# Altium schematic symbol library Schlib1.SchLib: 30 symbols
Pins are listed as number, name and electrical type; pins without a type are passive.

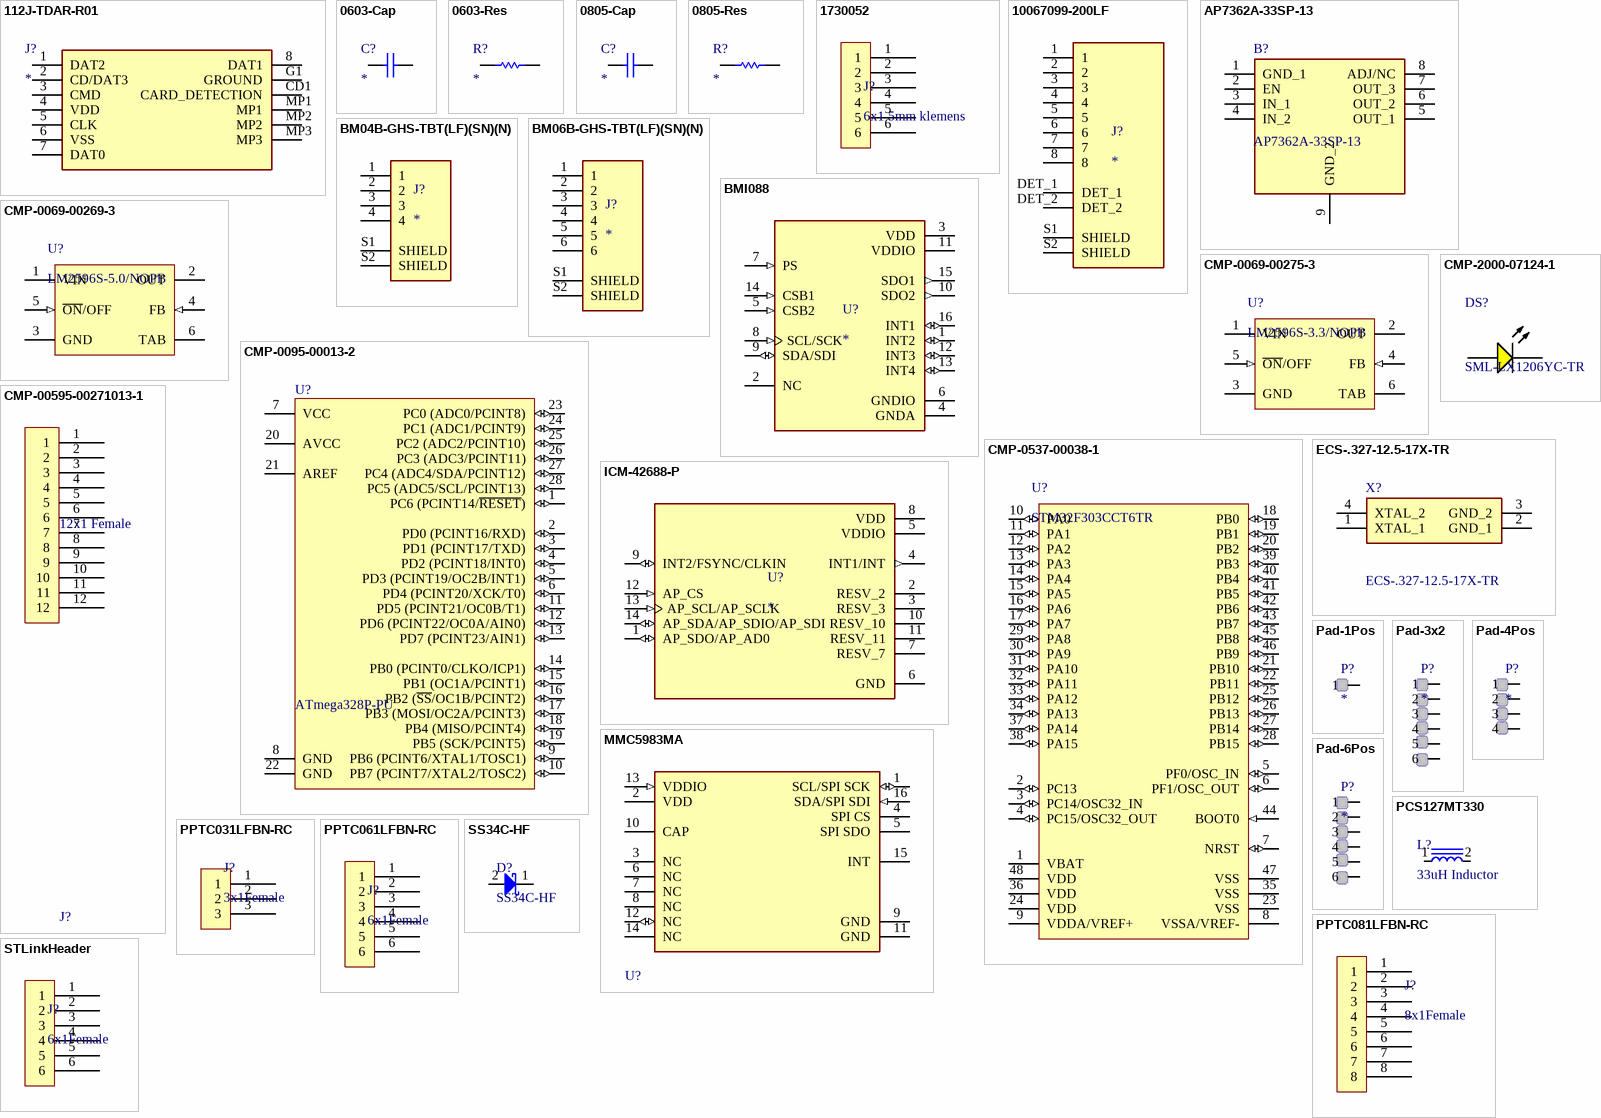
[diagram p0: symbols 112J-TDAR-R01 to STLinkHeader]

## 112J-TDAR-R01
designator J?
Connector; Manufacturer_Name: ATTEND; Manufacturer_Part_Number: 112J-TDAR-R01; Datasheet Link: https://cdn.sos.sk/productdata/2c/8b/de324bd3/112j-tdar-r01.pdf; Height: 2mm
footprint 112JTDARR01
pins: 1 DAT2, 2 CD/DAT3, 3 CMD, 4 VDD, 5 CLK, 6 VSS, 7 DAT0, 8 DAT1, CD1 CARD_DETECTION, G1 GROUND, MP1, MP2, MP3

## 0603-Cap
designator C?
footprint Capacitor-0603
pins: 1, 2

## 0603-Res
designator R?
footprint Resistor-0603
pins: 1, 2

## 0805-Cap
designator C?
footprint Capacitor-0805
pins: 1, 2

## 0805-Res
designator R?
footprint Resistor-0805
pins: 1, 2

## 1730052
designator J?, comment 6x1 5mm klemens
Phoenix Contact 1730052, MKDSP 1, 5/ 6, PCB terminal block; Supplier: Mouser; Supplier Part Number: 651-1730052; Manufacturer: Phoenix Contact; Manufacturer Part Number: 1730052; RoHS: Yes; Category: Terminal Blocks; Stock: 50; Pricing: 1=4,93, 10=4,84, 50=4,52, 100=4,16, 1000=3,98, 10000=3,98 (USD); ComponentLink1URL: http://components.arrow.com/part/dataview/51058200S75511N1555?src-supplier=Arrow+Electronics; ComponentLink1Description: http://components.arrow.com/part/dataview/51058200S75511N1555?src-supplier=Arrow+Electronics; ComponentLink2URL: http://www.phoenixcontact.com/us/products/1730052/pdf?src-supplier=Mouser; ComponentLink2Description: http://www.phoenixcontact.com/us/products/1730052/pdf?src-supplier=Mouser
footprint 6x1 5mm klemens
pins: 1, 2, 3, 4, 5, 6

## 10067099-200LF
designator J?
MF: {'manufacturer': u'Amphenol ICC (FCI)'}; MP: 10067099-200LF; Package: None; Price: None; Value: *; Availability: Unavailable
footprint AMPHENOL_10067099-200LF
pins: 1, 2, 3, 4, 5, 6, 7, 8, DET_1, DET_2, S1 SHIELD, S2 SHIELD

## AP7362A-33SP-13
designator B?
LDO Voltage Regulators LDO CMOS HiCurr SO-8 1.5A LowQ Adj 190mV; Manufacturer_Name: Diodes Incorporated; Geometry.Height: 1.5mm; Manufacturer_Part_Number: AP7362A-33SP-13; Mouser Part Number: 621-AP7362A-33SP-13; Mouser Price/Stock: https://www.mouser.co.uk/ProductDetail/Diodes-Incorporated/AP7362A-33SP-13?qs=M%2FOdCRO8QQ3CiX1oDLy5Bg%3D%3D; Arrow Part Number: AP7362A-33SP-13; Arrow Price/Stock: https://www.arrow.com/en/products/ap7362a-33sp-13/diodes-incorporated?utm_currency=USD&region=nac; Datasheet Link: https://www.diodes.com/assets/Datasheets/AP7362.pdf
footprint SOIC127P600X150-9N
pins: 1 GND_1, 2 EN, 3 IN_1, 4 IN_2, 5 OUT_1, 6 OUT_2, 7 OUT_3, 8 ADJ/NC, 9 GND_2

## BM04B-GHS-TBT(LF)(SN)(N)
designator J?
Conn Shrouded Header HDR 4 POS 1.25mm Solder ST Top Entry SMD T/R; MF: JST; MP: BM04B-GHS-TBT (LF)(SN)(N); SnapEDA_Link: https://www.snapeda.com/parts/BM04B-GHS-TBT%20(LF)(SN)(N)/JST/view-part/?ref=snap; Package: None; Value: *; Check_prices: https://www.snapeda.com/parts/BM04B-GHS-TBT%20(LF)(SN)(N)/JST/view-part/?ref=eda
footprint JST_BM04B-GHS-TBT(LF)(SN)(N)
pins: 1, 2, 3, 4, S1 SHIELD, S2 SHIELD

## BM06B-GHS-TBT(LF)(SN)(N)
designator J?
Connector Header Surface Mount 6 position 0.049 (1.25mm); MF: JST Sales; MP: BM06B-GHS-TBT(LF)(SN)(N); SnapEDA_Link: https://www.snapeda.com/parts/BM06B-GHS-TBT(LF)(SN)(N)/JST/view-part/?ref=snap; Package: None; Value: *; Check_prices: https://www.snapeda.com/parts/BM06B-GHS-TBT(LF)(SN)(N)/JST/view-part/?ref=eda
footprint JST_BM06B-GHS-TBT(LF)(SN)(N)
pins: 1, 2, 3, 4, 5, 6, S1 SHIELD, S2 SHIELD

## BMI088
designator U?
High-performance 6-axis inertial sensor (accelerometer + gyroscope) <a href="https://pricing.snapeda.com/parts/BMI088/Bosch%20Sensortec/view-part?ref=eda">Check prices</a>; MP: BMI088; Package: None; Value: *; Availability: Unavailable; Price: None
footprint PQFN50P450X300X100-16N
pins: 1 INT2 (io), 2 NC, 3 VDD (power), 4 GNDA (power), 5 CSB2 (in), 6 GNDIO (power), 7 PS (in), 8 SCL/SCK (in), 9 SDA/SDI (io), 10 SDO2 (out), 11 VDDIO (power), 12 INT3 (io), 13 INT4 (io), 14 CSB1 (in), 15 SDO1 (out), 16 INT1 (io)

## CMP-0069-00269-3
designator U?, comment LM2596S-5.0/NOPB
SIMPLE SWITCHER® Power Converter 150 KHz 3A Step-Down Voltage Regulator, 5-pin TO-263, Pb-Free; Manufacturer: Texas Instruments; PowerWise: N; PackageTopMarking: NSUZXYTTE#*LM2596S*-5.0 P+; ComponentLink1URL: http://www.ti.com/general/docs/lit/getliterature.tsp?genericPartNumber=LM2596&fileType=pdf; PackageDescription: TO-263, Molded, .400 x .390 x .180in, 5 Lead, .067in Pitch, Surface Mount; RoHS: Y; PinCount: 5; Code_JEDEC: MO-169-AB; ComponentLink1Description: Datasheet URL; PackageReference: KTT0005B; CompType: Switcher
footprint KTT0005B_N (DPAK, 5-Leads, Body 10.65x9.65mm, Pitch 1.7mm, IPC Medium Density)
footprint KTT0005B_M (DPAK, 5-Leads, Body 10.65x9.65mm, Pitch 1.7mm, IPC Low Density)
footprint KTT0005B_L (DPAK, 5-Leads, Body 10.65x9.65mm, Pitch 1.7mm, IPC High Density)
pins: 1 VIN (power), 2 OUT (power), 3 GND (power), 4 FB (in), 5 ~{ON}/OFF (in), 6 TAB (power)

## CMP-0069-00275-3
designator U?, comment LM2596S-3.3/NOPB
SIMPLE SWITCHER® Power Converter 150 KHz 3A Step-Down Voltage Regulator, 5-pin TO-263, Pb-Free; Manufacturer: Texas Instruments; PackageTopMarking: NSUZXYTTE#*LM2596S*-3.3 P+; PowerWise: N; RoHS: Y; PackageReference: KTT0005B; PackageDescription: TO-263, Molded, .400 x .390 x .180in, 5 Lead, .067in Pitch, Surface Mount; PinCount: 5; ComponentLink1Description: Datasheet URL; Code_JEDEC: MO-169-AB; ComponentLink1URL: http://www.ti.com/general/docs/lit/getliterature.tsp?genericPartNumber=LM2596&fileType=pdf; CompType: Switcher
footprint KTT0005B_N (DPAK, 5-Leads, Body 10.65x9.65mm, Pitch 1.7mm, IPC Medium Density)
footprint KTT0005B_M (DPAK, 5-Leads, Body 10.65x9.65mm, Pitch 1.7mm, IPC Low Density)
footprint KTT0005B_L (DPAK, 5-Leads, Body 10.65x9.65mm, Pitch 1.7mm, IPC High Density)
pins: 1 VIN (power), 2 OUT (power), 3 GND (power), 4 FB (in), 5 ~{ON}/OFF (in), 6 TAB (power)

## CMP-0095-00013-2
designator U?, comment ATmega328P-PU
8-bit AVR Microcontroller, 32KB Flash, 1KB EEPROM, 2KB SRAM, 28-pin PDIP, Industrial Grade (-40°C to 85°C); RevisionNote: DatasheetVersion updated. URLs added.; PackageVersion: revB, Sep-2001; PackageDescription: 28-lead (0.300"/7.62mm Wide) Plastic Dual Inline Package (PDIP); DatasheetVersion: revD, May-2011; ComponentLink1Description: Manufacturer URL; ComponentLink1URL: http://www.atmel.com/; PackageReference: 28P3; ComponentLink2Description: ATmega48A/48PA/88A/88PA/168A/168PA/328/328P Datasheet; ComponentLink3URL: http://www.atmel.com/dyn/resources/prod_documents/8271S.pdf; ComponentLink2URL: http://www.atmel.com/dyn/resources/prod_documents/8271.pdf; ComponentLink3Description: ATmega48A/48PA/88A/88PA/168A/168PA/328/328P Summary
footprint 28P3 (28-Pin Plastic Dual In-Line Package (PDIP))
pins: 1 PC6 (PCINT14/~{RESET}) (io), 2 PD0 (PCINT16/RXD) (io), 3 PD1 (PCINT17/TXD) (io), 4 PD2 (PCINT18/INT0) (io), 5 PD3 (PCINT19/OC2B/INT1) (io), 6 PD4 (PCINT20/XCK/T0) (io), 7 VCC (power), 8 GND (power), 9 PB6 (PCINT6/XTAL1/TOSC1) (io), 10 PB7 (PCINT7/XTAL2/TOSC2) (io), 11 PD5 (PCINT21/OC0B/T1) (io), 12 PD6 (PCINT22/OC0A/AIN0) (io), 13 PD7 (PCINT23/AIN1) (io), 14 PB0 (PCINT0/CLKO/ICP1) (io), 15 PB1 (OC1A/PCINT1) (io), 16 PB2 (~{SS}/OC1B/PCINT2) (io), 17 PB3 (MOSI/OC2A/PCINT3) (io), 18 PB4 (MISO/PCINT4) (io), 19 PB5 (SCK/PCINT5) (io), 20 AVCC (power), 21 AREF (power), 22 GND (power), 23 PC0 (ADC0/PCINT8) (io), 24 PC1 (ADC1/PCINT9) (io), 25 PC2 (ADC2/PCINT10) (io), 26 PC3 (ADC3/PCINT11) (io), 27 PC4 (ADC4/SDA/PCINT12) (io), 28 PC5 (ADC5/SCL/PCINT13) (io)

## CMP-0537-00038-1
designator U?, comment STM32F303CCT6TR
ARM Cortex-M4 32-bit MCU, 256 KB Flash, 48 KB Internal RAM, 37 I/Os, 48-Pin LQFP, -40 to 85 degC, Tape and Reel; I/Os (High Current): 37; Operating Frequency(F) (Processor speed) (MHz): 72; FLASH Size (Prog) (kB): 256; Supply Voltage(Vcc) min (V): 2; Internal RAM Size (kB): 48; Package Description: 48-Pin Low Profile Quad Flat Package, Body 7 x 7 mm, Pitch 0.5 mm; ComponentLink1URL: http://www.st.com/; Package Reference: LQFP48; ComponentLink1Description: Manufacturer URL; Packing: Tape and Reel; Core: ARM Cortex-M4; ComponentLink2Description: Datasheet; DatasheetVersion: Rev. 11; ComponentLink2URL: http://www.st.com/st-web-ui/static/active/en/resource/technical/document/datasheet/DM00058181.pdf; D/A Converter: 2; Mounting Technology: Surface Mount
footprint STM-LQFP48_L (QFP, 48-Leads, Body 7x7mm, Pitch 0.5mm, IPC High Density)
footprint STM-LQFP48_M (QFP, 48-Leads, Body 7x7mm, Pitch 0.5mm, IPC Low Density)
footprint STM-LQFP48_N (QFP, 48-Leads, Body 7x7mm, Pitch 0.5mm, IPC Medium Density)
pins: 1 VBAT (power) "Backup power supply", 2 PC13 (io) "PC13/TIM1_CH1N/RTC_TAMP1/RTC_TS/RTC_OUT/WKUP2", 3 PC14/OSC32_IN (io), 4 PC15/OSC32_OUT (io), 5 PF0/OSC_IN (io) "PF0/TIM1_CH3N/OSC_IN", 6 PF1/OSC_OUT (io), 7 NRST (io) "Device reset input/internal reset output (active low)", 8 VSSA/VREF- (power) "Analog ground/Negative reference voltage", 9 VDDA/VREF+ (power) "Analog power supply/Positive reference voltage", 10 PA0 (io) "PA0/TIM2_CH1/TIM2_ETR,TSC_G1_IO1,USART2_CTS,EVENTOUT/ADC1_IN1,RTC_TAMP2/WKUP1", 11 PA1 (io) "PA1/TIM2_CH2,TSC_G1_IO2,USART2_RTS_DE,TIM15_CH1N,EVENTOUT/ADC1_IN2,RTC_REFIN", 12 PA2 (io) "PA2/TIM2_CH3,TSC_G1_IO3,USART2_TX,COMP2_OUT,TIM15_CH1,EVENTOUT/ADC1_IN3,COMP2_INM", 13 PA3 (io) "PA3/TIM2_CH4,TSC_G1_IO4,USART2_RX,TIM15_CH2,EVENTOUT/ADC1_IN4", 14 PA4 (io) "PA4/TIM3_CH2,TSC_G2_IO1,SPI1_NSS,USART2_CK,EVENTOUT/ADC2_IN1,DAC1_OUT1,COMP2_INM4,COMP4_INM4,COMP6_INM4", 15 PA5 (io) "PA5/TIM2_CH1/TIM2_ETR,TSC_G2_IO2,SPI1_SCK,EVENTOUT/ADC2_IN2,DAC1_OUT2,OPAMP2_VINM", 16 PA6 (io) "PA6/TIM16_CH1,TIM3_CH1,TSC_G2_IO3,SPI1_MISO,TIM1_BKIN,EVENTOUT/ADC2_IN3,DAC2_OUT1,OPAMP2_VOUT", 17 PA7 (io) "PA7/TIM17_CH1,TIM3_CH2,TSC_G2_IO4,SPI1_MOSI,TIM1_CH1N,EVENTOUT/ADC2_IN4,COMP2_INP,OPAMP2_VINP", 18 PB0 (io) "PB0/TIM3_CH3,TSC_G3_IO2,TIM1_CH2N,EVENTOUT/ADC1_IN11,COMP4_INP,OPAMP2_VINP", 19 PB1 (io) "PB1/TIM3_CH4,TSC_G3_IO3,TIM1_CH3N,COMP4_OUT,EVENTOUT/ADC1_IN12", 20 PB2 (io) "PB2/TSC_G3_IO4,EVENTOUT/ADC2_IN12,COMP4_INM", 21 PB10 (io) "PB10/TIM2_CH3,TSC_SYNC,USART3_TX,EVENTOUT", 22 PB11 (io) "PB11/TIM2_CH4,TSC_G6_IO1,USART3_RX,EVENTOUT/COMP6_INP", 23 VSS (power) "Digital ground", 24 VDD (power) "Digital power supply", 25 PB12 (io) "PB12/TSC_G6_IO2,TIM1_BKIN,USART3_CK,EVENTOUT/ADC2_IN13", 26 PB13 (io) "PB13/TSC_G6_IO3,TIM1_CH1N,USART3_CTS,EVENTOUT/ADC1_IN13", 27 PB14 (io) "PB14/TIM15_CH1,TSC_G6_IO4,TIM1_CH2N,USART3_RTS_DE,EVENTOUT/ADC2_IN14,OPAMP2_VINP", 28 PB15 (io) "PB15/TIM15_CH2,TIM15_CH1N,TIM1_CH3N,EVENTOUT/ADC2_IN15,COMP6_INM,RTC_REFIN", 29 PA8 (io) "PA8/MCO,TIM1_CH1,USART1_CK,EVENTOUT", 30 PA9 (io) "PA9/TSC_G4_IO1,TIM1_CH2,USART1_TX,TIM15_BKIN,TIM2_CH3,EVENTOUT", 31 PA10 (io) "PA10/TIM17_BKIN,TSC_G4_IO2,TIM1_CH3,USART1_RX,COMP6_OUT,TIM2_CH4,EVENTOUT", 32 PA11 (io) "PA11/TIM1_CH1N,USART1_CTS,CAN_RX,TIM1_CH4,TIM1_BKIN2,EVENTOUT", 33 PA12 (io) "PA12/TIM16_CH1,TIM1_CH2N,USART1_RTS_DE,COMP2_OUT,CAN_TX,TIM1_ETR,EVENTOUT", 34 PA13 (io) "PA13/JTMS/SWDAT,TIM16_CH1N,TSC_G4_IO3,IR_OUT,USART3_CTS,EVENTOUT", 35 VSS (power), 36 VDD (power), 37 PA14 (io) "PA14/JTCK/SWCLK,TSC_G4_IO4,I2C1_SDA,TIM1_BKIN,USART2_TX,EVENTOUT", 38 PA15 (io) "PA15/JTDI,TIM2_CH1/TIM2_ETR,TSC_SYNC,I2C1_SCL,SPI1_NSS,USART2_RX,TIM1_BKIN,EVENTOUT", 39 PB3 (io) "PB3/JTDO/TRACESWO,TIM2_CH2,TSC_G5_IO1,SPI1_SCK,USART2_TX,TIM3_ETR,EVENTOUT", 40 PB4 (io) "PB4/NJTRST,TIM16_CH1,TIM3_CH1,TSC_G5_IO2,SPI1_MISO,USART2_RX,TIM17_BKIN,EVENTOUT", 41 PB5 (io) "PB5/TIM16_BKIN,TIM3_CH2,I2C1_SMBA,SPI1_MOSI,USART2_CK,TIM17_CH1,EVENTOUT", 42 PB6 (io) "PB6/TIM16_CH1N,TSC_G5_IO3,I2C1_SCL,USART1_TX,EVENTOUT", 43 PB7 (io) "PB7/TIM17_CH1N,TSC_G5_IO4,I2C1_SDA,USART1_RX,TIM3_CH4,EVENTOUT", 44 BOOT0 (in), 45 PB8 (io) "PB8/TIM16_CH1,TSC_SYNC,I2C1_SCL,USART3_RX,CAN_RX,TIM1_BKIN,EVENTOUT", 46 PB9 (io) "PB9/TIM17_CH1,I2C1_SDA,IR_OUT,USART3_TX,COMP2_OUT,CAN_TX,EVENTOUT", 47 VSS (power), 48 VDD (power)

## CMP-00595-00271013-1
designator J?, comment 12x1 Female
Conn Socket Strip F 12 POS 2.54mm Solder ST Thru-Hole; Part Number: PPTC121LFBN-RC; Manufacturer: Sullins; Is Female: yes; Symbol Hash: ea067654d0183d61e035900691e2d6794c626c0b8445c548c6502567bdefb3d8; Current Rating: 3A; Verification Version: 0.0.0.3; Voltage Rating: 250V; Number Of Contacts: 12; Conn Orientation: Straight; Connector Type: Header, Socket; Datasheet Version: L; Conn Gender: Female; Temperature Range High: +105°C; Digikey Description: CONN HDR 12POS 0.1 TIN PCB; Datasheet Date: 2019-08-20; Digikey Part Number: S6100-ND; ComponentLink2URL: https://drawings-pdf.s3.amazonaws.com/10492.pdf; ComponentLink2Description: Datasheet; Lead Free: Yes; Height: 8.7mm; Automotive: No; Temperature Range Low: -40°C; RoHS: TRUE; Pitch: 2.54mm; Number Of Rows: 1; Contact Material: Tin,Nickel; Package: 0; ComponentLink1Description: Upverter; Supplier 2: Mouser; Supplier 1: Digi-Key; ComponentLink1URL: https://upverter.com/part/id/4e787b82c790916c/; Supplier Part Number 1: S6100-ND; helpURL: https://upverter.com/part/id/4e787b82c790916c/; Temperature: -40°C to +105°C; ComponentLink2Description: Datasheet URL; Number of Positions: 12; Contact Material: Nickel, Tin; HelpURL: https://drawings-pdf.s3.amazonaws.com/10492.pdf; Lead Free: Lead Free; Min Operating Temperature: -40°C; Number of Rows: 1; Number of Contacts: 12; Mount: Through Hole; Width: 2.5mm; Length: 31mm; Packaging: Bulk; Housing Material: Plastic; Termination: Solder; Contact Plating: Tin; Max Operating Temperature: 105°C; RoHS: Compliant; Color: Black
footprint PPTC121LFBN-RC_MFG
pins: 1, 2, 3, 4, 5, 6, 7, 8, 9, 10, 11, 12

## CMP-2000-07124-1
designator DS?, comment SML-LX1206YC-TR
Yellow LED, Water Clear Len, 585 nm, 2.1 V, -40 to 85 degC, 2-Pin SMD, RoHS, Tape and Reel; Manufacturer: Lumex; Product Training Modules: LEDsBenefitsofCustomLEDandLCDTechnology; Millicandela Rating: 6mcd; Catalog Drawings: SML-LX1206SeriesTopSML-LX1206SeriesSideSML-LX1206SeriesBottomSML-LX1206SeriesFootprint; Wavelength - Peak: 585nm; Other Names: 67-1358-2LU60357TRSMLLX1206YCTR; Lens Style/Size: RectanglewithFlatTop; Current - Test: 20mA; Lens Color: Colorless; Viewing Angle: 160°; Voltage - Forward (Vf) (Typ): 2.1V; Online Catalog: SML-LX1206RectanglewithFlatTop1206PackageLEDs; Mounting Type: SurfaceMount; Package Description: 2-Pin Surface Mount Device, Body 3.2 x 1.5 mm; Datasheet Version: Rev. K, 08/2012; Features: -; Color: Yellow; RoHS Information: RoHSCertofCompliance; Package Reference: SML-LX1206YC-TR; Supplier Device Package: 1206; Standard Package: 3,000; Series: -; Wavelength - Dominant: -; Package / Case: 1206(3216Metric); Mounting Technology: SurfaceMount; Height (Max): 1.10mm; Lens Transparency: Clear; Datasheet URL: http://www.lumex.com/content/files/ProductAttachment/SML-LX1206YC-TR.pdf; Family: LEDIndication-Discrete; Manufacturer URL: http://www.lumexinstruments.com/; Packaging: Tape&Reel(TR); Category: Optoelectronics; Size / Dimension: 3.20mmLx1.60mmW
footprint LUMX-SML-LX1206YC-TR_V (SMD, 2-Leads, Body 3.2x1.5mm)
pins: 1 A, 2 K

## ECS-.327-12.5-17X-TR
designator X?
Crystals 32.768 KHz 12.5pF; Manufacturer_Name: ECS; Geometry.Height: 2.5mm; Mouser Part Number: 520-ECS327-12.5-17X; Mouser Price/Stock: https://www.mouser.co.uk/ProductDetail/ECS/ECS-.327-12.5-17X-TR?qs=CkbNAJEAr%2FTBahk9YtN2eg%3D%3D; Manufacturer_Part_Number: ECS-.327-12.5-17X-TR; Datasheet Link: https://www.ecsxtal.com/store/pdf/ecx-306x.pdf
footprint ECS32712517XTR
pins: 1 XTAL_1, 2 GND_1, 3 GND_2, 4 XTAL_2

## ICM-42688-P
designator U?
Accelerometer, Gyroscope, 6 Axis Sensor Output; MP: ICM-42688-P; Package: None; Value: *; Availability: Unavailable; Price: None
footprint PQFN50P300X250X97-14N
pins: 1 AP_SDO/AP_AD0 (io), 2 RESV_2, 3 RESV_3, 4 INT1/INT (out), 5 VDDIO (power), 6 GND (power), 7 RESV_7, 8 VDD (power), 9 INT2/FSYNC/CLKIN (io), 10 RESV_10, 11 RESV_11, 12 AP_CS (in), 13 AP_SCL/AP_SCLK (in), 14 AP_SDA/AP_SDIO/AP_SDI (io)

## MMC5983MA
designator U?  (value not drawn)
footprint Memsic_0_MFG
pins: 1 SCL/SPI SCK (io), 2 VDD, 3 NC, 4 SPI CS, 5 SPI SDO (power), 6 NC, 7 NC (power), 8 NC, 9 GND (power), 10 CAP, 11 GND, 12 NC (io), 13 VDDIO (in), 14 NC (power), 15 INT, 16 SDA/SPI SDI (in)

## Pad-1Pos
designator P?
footprint Pad-1Pos
pins: 1

## Pad-3x2
designator P?
footprint Pad-3x2
pins: 1, 2, 3, 4, 5, 6

## Pad-4Pos
designator P?
footprint Pad-4Pos
pins: 1, 2, 3, 4

## Pad-6Pos
designator P?
footprint Pad-6 Pos
pins: 1, 2, 3, 4, 5, 6

## PCS127MT330
designator L?, comment 33uH Inductor
Inductor Power Shielded Wirewound 33uH 20% 1KHz Ferrite 3A 65mOhm DCR T/R; Manufacturer: Stackpole Electronics; Manufacturer Part Number: PCS127MT330; Supplier: Avnet; Supplier Part Number: PCS127MT330; RoHS: Yes; Category: Inductors; Core Material: Ferrite; Packaging: Tape and Reel; Tolerance: 20%; Value: 33uH; Max DC Current: 3A; Height: 8mm; Depth: 12.3mm; Radiation Hardening: No; RoHS Compliant: Yes; ComponentLink1URL: https://www.seielect.com/catalog/SEI-pcs.pdf?src-supplier=Avnet; ComponentLink1Description: https://www.seielect.com/catalog/SEI-pcs.pdf?src-supplier=Avnet
footprint FP-DR127-MFG
pins: 1, 2

## PPTC031LFBN-RC
designator J?, comment 3x1Female
Female, 3C, Straight, .100"CC; 3.20mm Tail, No Mt. 100u" Tin; PBT, Phos Bronze, 105 C; Manufacturer: Sullins; Manufacturer Part Number: PPTC031LFBN-RC; Supplier: Future Electronics; Supplier Part Number: 2482834; RoHS: Yes; Category: Connectors; Pricing: 1000=0,179, 2000=0,176, 3000=0,175, 5000=0,173, 10000=0,17 (USD); ComponentLink1URL: https://media.digikey.com/pdf/Data%20Sheets/Sullins%20PDFs/Female_Headers.100_DS.pdf?src-supplier=Digikey; ComponentLink1Description: https://media.digikey.com/pdf/Data%20Sheets/Sullins%20PDFs/Female_Headers.100_DS.pdf?src-supplier=Digikey; ComponentLink2URL: https://datasheet.octopart.com/PPTC031LFBN-RC-Sullins-datasheet-41308905.pdf?src-supplier=Future+Electronics; ComponentLink2Description: https://datasheet.octopart.com/PPTC031LFBN-RC-Sullins-datasheet-41308905.pdf?src-supplier=Future+Electronics; ComponentLink3URL: http://www.sullinscorp.com/catalogs/78_Page80-81_HEADER_.100_2.54mm_FEMALE.pdf?src-supplier=Future+Electronics; ComponentLink3Description: http://www.sullinscorp.com/catalogs/78_Page80-81_HEADER_.100_2.54mm_FEMALE.pdf?src-supplier=Future+Electronics
footprint 3x1Female
pins: 1, 2, 3

## PPTC061LFBN-RC
designator J?, comment 6x1Female
Female, 6 C, Straight, .100"CC; 3.20mm Tail, No Mt. 100u" Tin; PBT, Phos Bronze, 105 C; Manufacturer: Sullins; Manufacturer Part Number: PPTC061LFBN-RC; Supplier: Future Electronics; Supplier Part Number: 5286703; RoHS: Yes; Category: Connectors; Pricing: 560=0,255, 2240=0,25, 8400=0,24 (USD); ComponentLink1URL: https://media.digikey.com/pdf/Data%20Sheets/Sullins%20PDFs/Female_Headers.100_DS.pdf?src-supplier=Digikey; ComponentLink1Description: https://media.digikey.com/pdf/Data%20Sheets/Sullins%20PDFs/Female_Headers.100_DS.pdf?src-supplier=Digikey; ComponentLink2URL: https://datasheet.octopart.com/PPTC061LFBN-RC-Sullins-datasheet-41308905.pdf?src-supplier=Future+Electronics; ComponentLink2Description: https://datasheet.octopart.com/PPTC061LFBN-RC-Sullins-datasheet-41308905.pdf?src-supplier=Future+Electronics; ComponentLink3URL: http://www.sullinscorp.com/catalogs/78_Page80-81_HEADER_.100_2.54mm_FEMALE.pdf?src-supplier=Future+Electronics; ComponentLink3Description: http://www.sullinscorp.com/catalogs/78_Page80-81_HEADER_.100_2.54mm_FEMALE.pdf?src-supplier=Future+Electronics
footprint 6x1Female
pins: 1, 2, 3, 4, 5, 6

## PPTC081LFBN-RC
designator J?, comment 8x1Female
Female, 8C, Straight, .100"CC; 3.20mm Tail, No Mt. 100u" Tin; PBT, Phos Bronze, 105 C; Manufacturer: Sullins; Manufacturer Part Number: PPTC081LFBN-RC; Supplier: Future Electronics; Supplier Part Number: 9009020; RoHS: Yes; Category: Connectors; Stock: 13573; Pricing: 1=0,34, 100=0,33, 250=0,325, 1000=0,315, 2500=0,3 (USD); Contact Material: 150ConductorMaterial; Housing Material: 4239ConductorMaterial; Length: 20.8mm; Width: 2.5mm; Height: 8.5mm; Lead Free: 5697LeadFree; ComponentLink1URL: https://media.digikey.com/pdf/Data%20Sheets/Sullins%20PDFs/Female_Headers.100_DS.pdf?src-supplier=Digikey; ComponentLink1Description: https://media.digikey.com/pdf/Data%20Sheets/Sullins%20PDFs/Female_Headers.100_DS.pdf?src-supplier=Digikey; ComponentLink2URL: https://datasheet.octopart.com/PPTC081LFBN-RC-Sullins-datasheet-41308905.pdf?src-supplier=Future+Electronics; ComponentLink2Description: https://datasheet.octopart.com/PPTC081LFBN-RC-Sullins-datasheet-41308905.pdf?src-supplier=Future+Electronics; ComponentLink3URL: http://www.sullinscorp.com/catalogs/78_Page80-81_HEADER_.100_2.54mm_FEMALE.pdf?src-supplier=Future+Electronics; ComponentLink3Description: http://www.sullinscorp.com/catalogs/78_Page80-81_HEADER_.100_2.54mm_FEMALE.pdf?src-supplier=Future+Electronics
footprint 8x1Female
pins: 1, 2, 3, 4, 5, 6, 7, 8

## SS34C-HF
designator D?
Manufacturer: Comchip; Supplier: Mouser; Supplier Part Number: 750-SS34C-HF; Manufacturer Part Number: SS34C-HF; RoHS: Yes; Pricing: 1=0,46, 10=0,36, 50=0,36, 100=0,216, 1000=0,136, 10000=0,108 (USD)
footprint SS34C-HF
pins: 1, 2

## STLinkHeader
designator J?, comment 6x1Female
Female, 6 C, Straight, .100"CC; 3.20mm Tail, No Mt. 100u" Tin; PBT, Phos Bronze, 105 C; Manufacturer: Sullins; Manufacturer Part Number: PPTC061LFBN-RC; Supplier: Future Electronics; Supplier Part Number: 5286703; RoHS: Yes; Category: Connectors; Pricing: 560=0,255, 2240=0,25, 8400=0,24 (USD); ComponentLink1URL: https://media.digikey.com/pdf/Data%20Sheets/Sullins%20PDFs/Female_Headers.100_DS.pdf?src-supplier=Digikey; ComponentLink1Description: https://media.digikey.com/pdf/Data%20Sheets/Sullins%20PDFs/Female_Headers.100_DS.pdf?src-supplier=Digikey; ComponentLink2URL: https://datasheet.octopart.com/PPTC061LFBN-RC-Sullins-datasheet-41308905.pdf?src-supplier=Future+Electronics; ComponentLink2Description: https://datasheet.octopart.com/PPTC061LFBN-RC-Sullins-datasheet-41308905.pdf?src-supplier=Future+Electronics; ComponentLink3URL: http://www.sullinscorp.com/catalogs/78_Page80-81_HEADER_.100_2.54mm_FEMALE.pdf?src-supplier=Future+Electronics; ComponentLink3Description: http://www.sullinscorp.com/catalogs/78_Page80-81_HEADER_.100_2.54mm_FEMALE.pdf?src-supplier=Future+Electronics
footprint stLinkHeader
pins: 1, 2, 3, 4, 5, 6